# Altium footprint library Tester_componete_PCB.PcbLib: 21 footprints (part 2 of 2)
Each footprint in its own frame and in the unit in brackets; x right, y up, seen from the top. Pads: shape width x height; smd on the part's side, far side on the other; paste and mask are expansions set on the pad; w line width, h text height; cw(c..) or ccw(c..) is an arc to the next point about the centre after c.
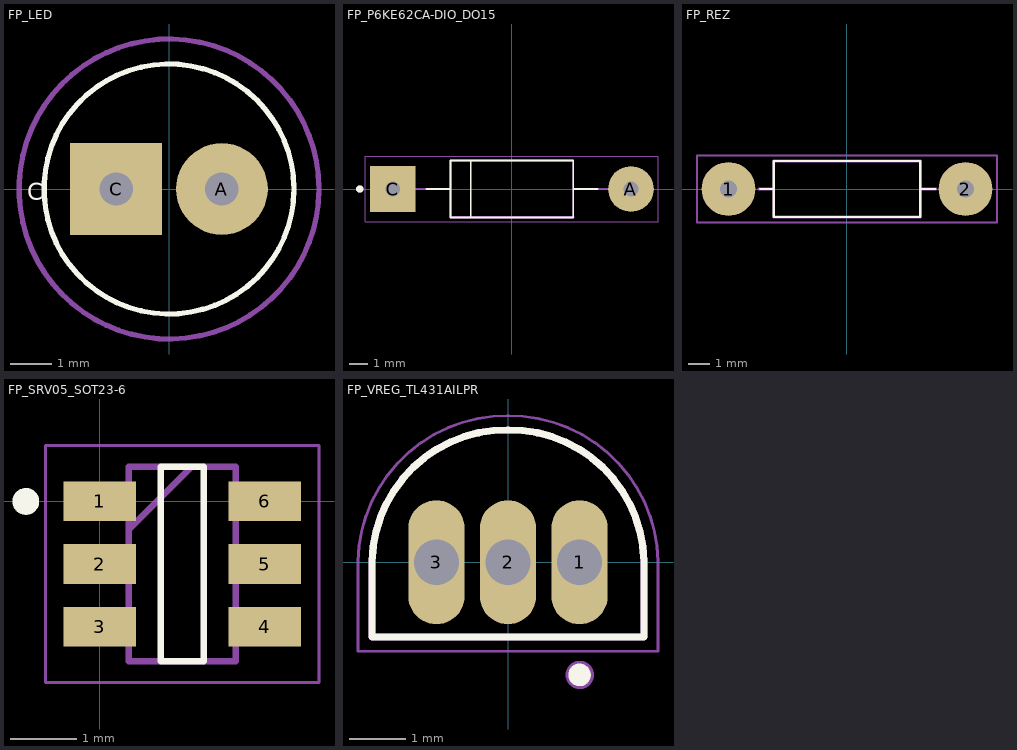
[diagram p1: the footprints below, top view; thin cyan lines are the x and y axes]

## FP_LED [mm]
pads (2):
  round 2.2 hole 0.8: A(1.27,0)
  rect 2.2x2.2 / inner round 2.2 / far side rect 2.2x2.2 hole 0.8: C(-1.27,0)
Top Overlay:
  circle w0.127: c0,0 r3
  text "C" at -3.4,-0.275 h0.4
Courtyard:
  circle w0.127: c0,0 r3.6
3D body "step_temp.STEP": height 9.6, standoff -26, extent -2.5,-2.95 2.95,2.95

## FP_P6KE62CA-DIO_DO15 [mm]
height 3.6
pads (2):
  round 2.5 hole 0.8 mask+0.102: A(6.5,0)
  rect 2.5x2.5 / inner round 2.5 / far side rect 2.5x2.5 hole 0.8 mask+0.102: C(-6.5,0)
Top Overlay:
  circle w0.2: c-8.3,0 r0.1
  lines w0.1: -4.675,0 -3.35,0 ; -2.25,-1.55 -2.25,1.55 ; 4.675,0 3.35,0 ; -3.35,0 -3.35,-1.55 3.35,-1.55 3.35,0 ; -3.35,0 -3.35,1.55 3.35,1.55 3.35,0
Assembly:
  circle w0.2: c-8.3,0 r0.1
  lines w0.1: -6.5,0 -3.35,0 ; -3.35,1.55 3.35,1.55 3.35,0 ; 3.35,-1.55 3.35,0 ; 6.5,0 3.35,0
Mechanical 13:
  lines w0.127: -3.35,1.55 -3.35,0 -3.35,-1.55 3.35,-1.55
Courtyard:
  lines w0.05: -8,-1.8 7.975,-1.8 7.975,1.8 -8,1.8 -8,-1.8
3D body "step_temp.STEP": height 3.6, standoff -17.1, extent -6.9,-1.8 6.9,1.8

## FP_REZ [mm]
pads (2):
  round 2.5 hole 0.8: 1(-5.5,0) 2(5.5,0)
Top Overlay:
  lines w0.1: -4.025,0 -3.4,0 ; 4.1,0 3.4,0 ; -3.4,0 -3.4,-1.3 3.4,-1.3 3.4,0 ; -3.4,0 -3.4,1.3 3.4,1.3 3.4,0
Assembly:
  lines w0.127: -4.1,0 -3.4,0 ; 4.125,0 3.4,0 ; -3.4,0 -3.4,-1.3 3.4,-1.3 3.4,0 ; -3.4,0 -3.4,1.3 3.4,1.3 3.4,0
Courtyard:
  lines w0.1: -6.962,-1.562 6.963,-1.562 6.963,1.563 -6.962,1.563 -6.962,-1.562
3D body "step_temp.STEP": height 2.4, standoff -26.95, extent -5.775,-1.2 5.775,1.2

## FP_SRV05_SOT23-6 [mm]
pads (6):
  rect 1.1x0.6 smd mask+0.05: 1(0,0) 2(0,-0.95) 3(0,-1.9) 4(2.5,-1.9) 5(2.5,-0.95) 6(2.5,0)
Top Overlay:
  circle w0.2: c-1.125,0 r0.103
  lines w0.1: 0.925,-2.425 0.925,0.525 1.575,0.525 1.575,-2.425 0.925,-2.425
Assembly:
  lines w0.1: 0.438,-0.425 1.388,0.525 ; 0.438,-2.425 0.438,0.525 2.062,0.525 2.062,-2.425 0.438,-2.425
Courtyard:
  lines w0.05: -0.825,-2.75 3.325,-2.75 3.325,0.85 -0.825,0.85 -0.825,-0.05 -0.825,-1.85 -0.825,-2.75
3D body "step_temp.STEP": height 1.45, standoff 0, extent -0.15,-2.4 2.65,0.5

## FP_VREG_TL431AILPR [mm]
height 7.35
pads (3):
  oval 1x2.2 hole 0.8 mask+0.05: 1(1.27,0) 2(0,0) 3(-1.27,0)
Top Overlay:
  circle w0.2: c1.27,-2 r0.1
  lines w0.127: -2.412,0 -2.412,-1.33 2.412,-1.33 2.412,0 ; -2.412,0.01 cw(c-0.031,-0.031) 0.01,2.35 ; -0.01,2.35 cw(c0.031,-0.031) 2.412,0.01
Assembly:
  circle w0.2: c1.275,-2 r0.151
  lines w0.127: -2.412,0 -2.412,-1.33 2.412,-1.33 2.412,0 ; -2.412,0.01 cw(c-0.031,-0.031) 0.01,2.35 ; -0.01,2.35 cw(c0.031,-0.031) 2.412,0.01
Courtyard:
  lines w0.05: -2.662,0 -2.662,-1.58 2.662,-1.58 2.662,0 ; -2.662,0.015 cw(c-0.031,-0.031) 0.015,2.6 ; -0.015,2.6 cw(c0.031,-0.031) 2.662,0.015